# Altium footprint library chipfc_libs.PCBLIB: 315 footprints (part 2 of 20)
Each footprint in its own frame and in the unit in brackets; x right, y up, seen from the top. Pads: shape width x height; smd on the part's side, far side on the other; paste and mask are expansions set on the pad; w line width, h text height; cw(c..) or ccw(c..) is an arc to the next point about the centre after c.
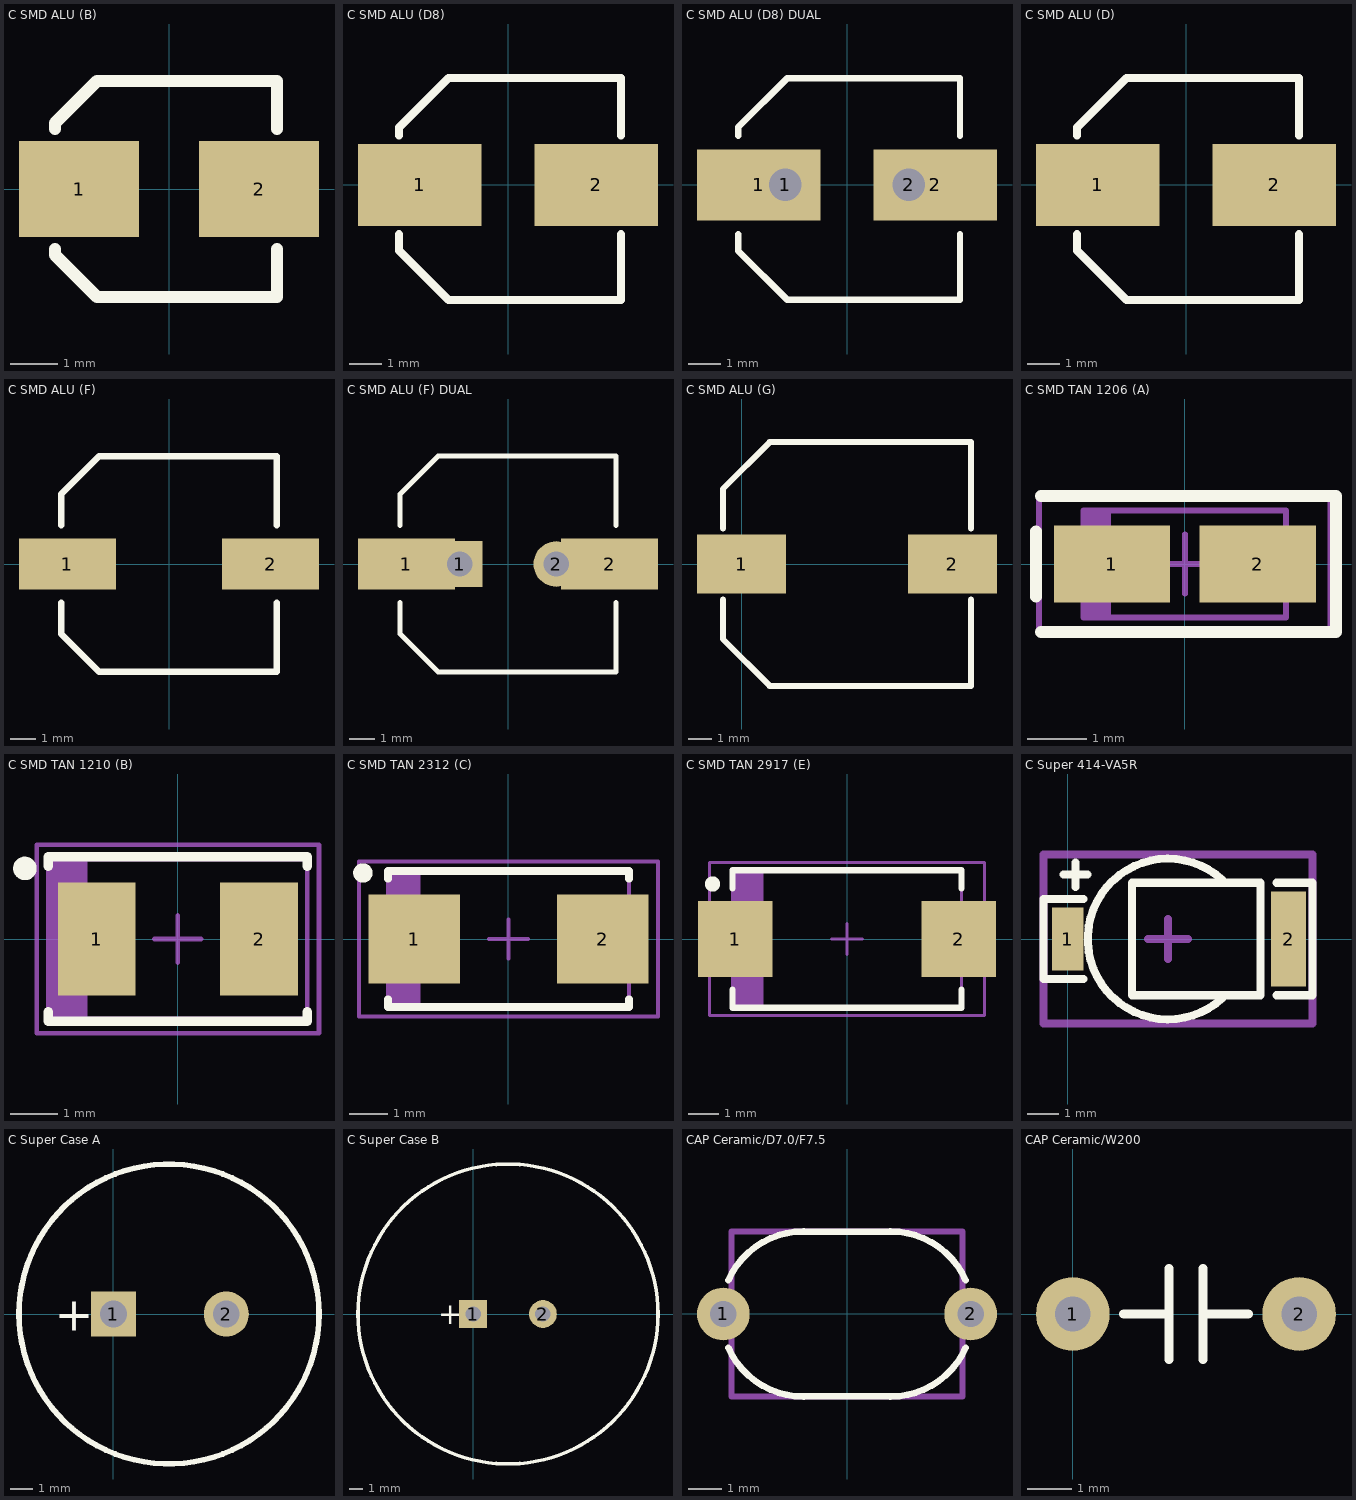
[diagram p1: the footprints below, top view; thin cyan lines are the x and y axes]

## C SMD ALU (B) [mil] "SMD Aluminum Electrolytic Capacitor, size D (4.0 x 5.4 mm)"
height 212.6
pads (2):
  rect 100x80 smd: 1(-75,0) 2(75,0)
Top Overlay:
  lines w10: -95,-50 -95,-55 -60,-90 90,-90 90,-50 ; -95,50 -95,55 -60,90 90,90 90,50
3D body "User Library-ALU-B.STEP": height 212.6, standoff 0, extent -90.56,-84.65 90.54,84.64

## C SMD ALU (D8) [mil] "SMD Aluminum Electrolytic Capacitor, size D8 (6.3 x 7.7 mm)"
height 303.15
pads (2):
  rect 150x100 smd: 1(-107.5,0) 2(107.5,0)
Top Overlay:
  lines w10: -132.5,-60 -132.5,-80 -72.5,-140 137.5,-140 137.5,-60 ; -132.5,60 -132.5,70 -72.5,130 137.5,130 137.5,60
3D body "User Library-ALU-D8.STEP": height 303.15, standoff 0, extent -137.79,-134.92 137.8,124.92

## C SMD ALU (D8) DUAL [mm] "SMD Aluminum Electrolytic Capacitor, size D8 (6.3 x 7.7 mm)"
height 7.7
pads (4):
  rect 3.81x2.2 smd: 1(-2.73,0) 2(2.73,0)
  rect 1.8x1.8 hole 1: 1(-1.905,0)
  round 1.8 hole 1: 2(1.905,0)
Top Overlay:
  lines w0.2: -3.365,-1.524 -3.365,-2.032 -1.841,-3.556 3.492,-3.556 3.492,-1.524 ; -3.365,1.524 -3.365,1.778 -1.841,3.302 3.492,3.302 3.492,1.524
3D body "User Library-ALU-D8.STEP": height 7.7, standoff 0, extent -3.5,-3.427 3.5,3.173

## C SMD ALU (D) [mil] "SMD Aluminum Electrolytic Capacitor, size D (6.3 x 5.4 mm)"
height 212.6
pads (2):
  rect 150x100 smd: 1(-107.5,0) 2(107.5,0)
Top Overlay:
  lines w10: -132.5,-60 -132.5,-80 -72.5,-140 137.5,-140 137.5,-60 ; -132.5,60 -132.5,70 -72.5,130 137.5,130 137.5,60
3D body "User Library-ALU-D.STEP": height 212.6, standoff 0, extent -135.3,-134.84 140.3,125

## C SMD ALU (F) [mm] "SMD Aluminum Electrolytic Capacitor, size F (8.0 x 10.2 mm)"
height 10.2
pads (2):
  rect 3.81x2 smd: 1(-4,0) 2(4,0)
Top Overlay:
  lines w0.254: -4.25,-1.524 -4.25,-2.75 -2.75,-4.25 4.25,-4.25 4.25,-1.524 ; -4.25,1.524 -4.25,2.75 -2.75,4.25 4.25,4.25 4.25,1.524
3D body "User Library-ALU-F.STEP": height 10.2, standoff 0, extent -4.95,-4.15 4.95,4.15

## C SMD ALU (F) DUAL [mm] "SMD Aluminum Electrolytic Capacitor, size F (8.0 x 10.2 mm)"
height 10.2
pads (4):
  rect 3.81x2 smd: 1(-4,0) 2(4,0)
  rect 1.8x1.8 hole 1: 1(-1.905,0)
  round 1.8 hole 1: 2(1.905,0)
Top Overlay:
  lines w0.2: -4.25,-1.524 -4.25,-2.75 -2.75,-4.25 4.25,-4.25 4.25,-1.524 ; -4.25,1.524 -4.25,2.75 -2.75,4.25 4.25,4.25 4.25,1.524
3D body "User Library-ALU-F.STEP": height 10.2, standoff 0, extent -4.95,-4.15 4.95,4.15

## C SMD ALU (G) [mm] "SMD Aluminum Electrolytic Capacitor, size G (10.0 x 10.2 mm)"
height 10.2
pads (2):
  rect 3.81x2.54 smd: 1(0,0) 2(9,0)
Top Overlay:
  lines w0.254: -0.8,-1.524 -0.8,-3.2 1.2,-5.2 9.8,-5.2 9.8,-1.524 ; -0.8,1.524 -0.8,3.2 1.2,5.2 9.8,5.2 9.8,1.524
3D body "User Library-ALU-G.STEP": height 10.2, standoff 0, extent -1.3,-5.15 10.3,5.15

## C SMD TAN 1206 (A) [mm] "Molded Capacitor, 2-Leads, Body 3.2x1.6mm, IPC Medium Density"
height 1.8
pads (2):
  rect 1.95x1.3 smd: 1(-1.225,0) 2(1.225,0)
Top Overlay:
  lines w0.2: -2.5,-0.55 -2.5,0.55
  lines w0.203: -2.413,-1.143 2.54,-1.143 2.54,1.143 -2.413,1.143
Mechanical 13:
  rectangle: -1.7,-0.9 -1.243,0.9
  lines w0.1: -1.7,-0.9 1.7,-0.9 1.7,0.9 -1.7,0.9 -1.7,-0.9
Mechanical 15:
  lines w0.1: -0.5,0 0.5,0 ; 0,-0.5 0,0.5 ; -2.45,-1.15 2.45,-1.15 2.45,1.15 -2.45,1.15 -2.45,-1.15
3D body "User Library-Solid Tantalum Chip Capacitor A case.step": height 1.8, standoff -0.04, extent -2.398,-0.9 2.398,0.903

## C SMD TAN 1210 (B) [mm] "Molded Capacitor, 2-Leads, Body 6.0x3.2mm, IPC Medium Density"
height 2.8
pads (2):
  rect 1.65x2.4 smd: 1(-1.725,0) 2(1.725,0)
Top Overlay:
  circle w0.25: c-3.25,1.5 r0.125
  lines w0.2: -2.75,-1.55 -2.75,-1.75 2.75,-1.75 2.75,-1.55 ; -2.75,1.55 -2.75,1.75 2.75,1.75 2.75,1.55
Mechanical 13:
  rectangle: -2.75,-1.65 -1.916,1.75
  lines w0.1: -2.75,-1.7 2.75,-1.7 2.75,1.7 -2.75,1.7 -2.75,-1.7
Mechanical 15:
  lines w0.1: -0.5,0 0.5,0 ; 0,-0.5 0,0.5 ; -3,-2 3,-2 3,2 -3,2 -3,-2
3D body "User Library-AVX_BCASE.step": height 2.03, standoff 0, extent -1.85,-1.465 1.85,1.465

## C SMD TAN 2312 (C) [mm] "Molded Capacitor, 2-Leads, Body 6.0x3.2mm, IPC Medium Density"
height 2.8
pads (2):
  rect 2.35x2.3 smd: 1(-2.425,0) 2(2.425,0)
Top Overlay:
  circle w0.25: c-3.75,1.7 r0.125
  lines w0.2: -3.1,-1.55 -3.1,-1.75 3.1,-1.75 3.1,-1.55 ; -3.1,1.55 -3.1,1.75 3.1,1.75 3.1,1.55
Mechanical 13:
  rectangle: -3.1,-1.7 -2.266,1.7
  lines w0.1: -3.1,-1.7 3.1,-1.7 3.1,1.7 -3.1,1.7 -3.1,-1.7
Mechanical 15:
  lines w0.1: -0.5,0 0.5,0 ; 0,-0.5 0,0.5 ; -3.85,-2 3.85,-2 3.85,2 -3.85,2 -3.85,-2
3D body "User Library-Tantalum Capacitor Case C.STEP": height 2.68, standoff -0.01, extent -3.093,-1.58 3.093,1.626

## C SMD TAN 2917 (E) [mm] "Molded Capacitor, 2-Leads, Body 7.3x4.3mm, IPC Medium Density"
height 4.3
pads (2):
  rect 2.45x2.5 smd: 1(-3.66,0) 2(3.66,0)
Top Overlay:
  circle w0.25: c-4.4,1.8 r0.125
  lines w0.2: -3.75,-1.65 -3.75,-2.25 3.75,-2.25 3.75,-1.65 ; -3.75,1.65 -3.75,2.25 3.75,2.25 3.75,1.65
Mechanical 13:
  rectangle: -3.75,-2.25 -2.741,2.25
  lines w0.1: -3.75,-2.25 -3.75,2.25 3.75,2.25 3.75,-2.25 -3.75,-2.25
Mechanical 15:
  lines w0.1: -0.5,0 0.5,0 ; 0,-0.5 0,0.5 ; -4.5,-2.5 -4.5,2.5 4.5,2.5 4.5,-2.5 -4.5,-2.5
3D body "User Library-Solid Tantalum Chip Capacitor.step": height 3.1, standoff -0.04, extent -4.498,-2.299 4.498,2.311

## C Super 414-VA5R [mm] "Taiyou Yuden's coin type PAS Capacitor"
pads (2):
  rect 1x2 smd: 1(0,0)
  rect 1.1x3 smd: 2(6.985,0)
Top Overlay:
  lines w0.254: -0.127,2.032 0.635,2.032 ; 0.254,1.651 0.254,2.413 ; 0.508,-1.27 -0.762,-1.27 -0.762,1.27 0.508,1.27 ; 4.903,-1.861 cw(c3.175,0) 4.903,1.861 ; 6.604,-1.778 7.747,-1.778 7.747,1.778 6.604,1.778 ; 2.032,-1.778 6.096,-1.778 6.096,1.778 2.032,1.778 2.032,-1.778
Mechanical 15:
  lines w0.254: 2.54,0 3.81,0 ; 3.175,-0.635 3.175,0.635 ; -0.762,-2.667 7.747,-2.667 7.747,2.667 -0.762,2.667 -0.762,-2.667
3D body: height 1.72, standoff 0.1, extent 0.794,-2.395 5.575,2.395

## C Super Case A [mil]
pads (2):
  rect 80x80 hole 47.24: 1(0,0)
  round 80 hole 47.24: 2(200,0)
Top Overlay:
  circle w10: c98.43,0 r265.75
  text "+" at -103.74,-29.53 h60
3D body "User Library-Cap2.step": height 295.28, standoff -196.85, extent -158.46,-256.89 355.32,256.89

## C Super Case B [mm]
pads (2):
  rect 2x2 hole 1.1: 1(0,0)
  round 2 hole 1.1: 2(5,0)
Top Overlay:
  circle w0.254: c2.5,0 r10.75
  text "+" at -2.5,-0.75 h1.52
3D body "User Library-Ionistor.step": height 8.01, standoff -6, extent -8.25,-10.738 13.26,10.738

## CAP Ceramic/D7.0/F7.5 [mm]
pads (2):
  round 1.6 hole 0.8: 1(-3.75,0) 2(3.75,0)
Top Overlay:
  lines w0.2: -3.6,-1.025 ccw(c-1.316,-0.008) -1.316,-2.508 ; -3.6,1.025 cw(c-1.316,0.008) -1.316,2.508 ; -1.5,-2.5 1.5,-2.5 ; -1.5,2.5 1.5,2.5 ; 1.316,-2.508 ccw(c1.316,-0.008) 3.6,-1.025 ; 1.316,2.508 cw(c1.316,0.008) 3.6,1.025
Mechanical 1:
  lines w0.178: -3.5,-2.5 -3.5,2.5 3.5,2.5 3.5,-2.5 -3.5,-2.5
3D body "User Library-Panasonic ECK-A3D102KBP.step": height 8.63, standoff -4.57, extent -4.001,-1.198 4,1.198
3D body: height 10.49, standoff 3.01, extent -3.72,-2.5 3.75,2.5

## CAP Ceramic/W200 [mil]
pads (2):
  round 65 hole 31: 1(0,0) 2(200,0)
Top Overlay:
  lines w8: 45,0 85,0 ; 85,-40 85,40 ; 115,-40 115,40 ; 115,0 155,0
3D body "User Library-CAP CERAMICO.step": height 180.55, standoff -35.1, extent -5.56,-41.67 205.5,41.01